# Altium integrated library Transistor.IntLib: 21 symbols
Pins are listed as number, name and electrical type; pins without a type are passive.

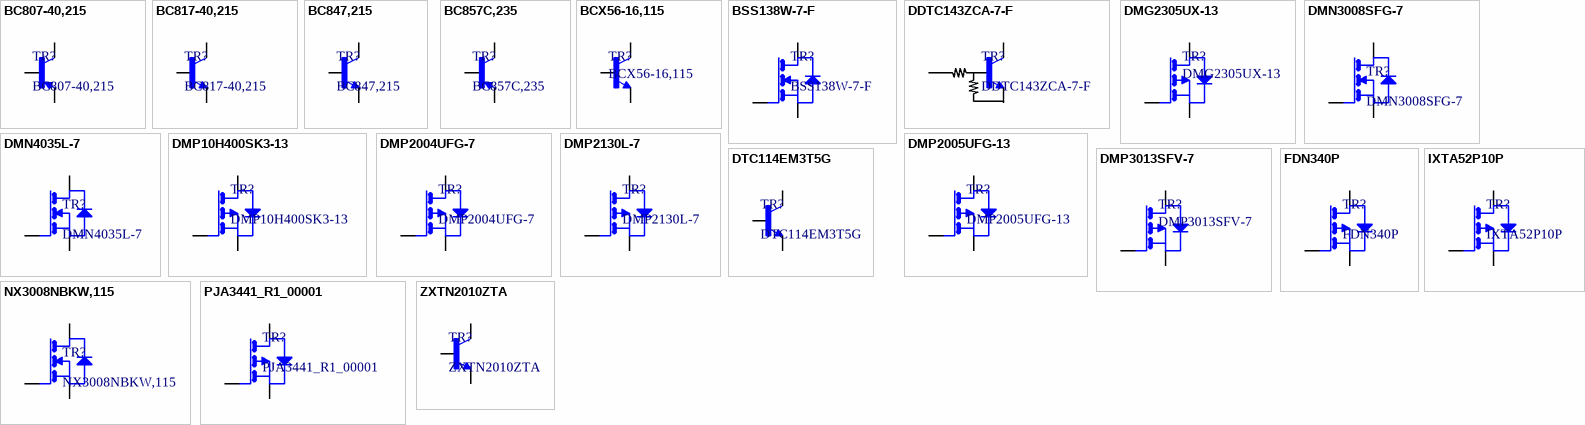
[diagram p0: symbols BC807-40,215 to ZXTN2010ZTA]

## BC807-40,215
designator TR?
TRANS PNP 45V 0.5A SOT23; Manufacturer: Nexperia; Purpose Of Usage: BASIC; Supplier 1: Digi-Key; Manufacturer Part Number: BC807-40,215; RoHS: YES; Category: TRANSISTOR; Supplier Part Number 1: 1727-2917-1-ND; Case/Package: SOT-23-3; Max Operating Temperature: 150°C; Min Operating Temperature: -55°C; Mount: SMD; Sub-Category: PNP; Stock ID: ??
footprint SOT23-3 (SOT23, 3-Leads, Body 2.92x2.51mm, Pitch 0.95mm, IPC Medium Density)
pins: 1 B, 2 E, 3 C

## BC817-40,215
designator TR?
TRANS NPN 45V 0.5A SOT23; Manufacturer: Nexperia; Purpose Of Usage: BASIC; Supplier 1: Digi-Key; Manufacturer Part Number: BC817-40,215; RoHS: YES; Category: TRANSISTOR; Supplier Part Number 1: 1727-2919-1-ND; Case/Package: SOT-23-3; Max Operating Temperature: 150°C; Min Operating Temperature: -55°C; Mount: SMD; Sub-Category: NPN; Stock ID: ??
footprint SOT23-3 (SOT23, 3-Leads, Body 2.92x2.51mm, Pitch 0.95mm, IPC Medium Density)
pins: 1 B, 2 E, 3 C

## BC847,215
designator TR?
TRANS NPN 45V 0.1A SOT23; Manufacturer: Nexperia; Purpose Of Usage: BASIC; Supplier 1: Digi-Key; Supplier Part Number 1: 1727-4855-1-ND; Manufacturer Part Number: BC847,215; RoHS: NO; Category: TRANSISTOR; Case/Package: SOT-23-3; Max Operating Temperature: 150°C; Min Operating Temperature: -55°C; Mount: SMD; Sub-Category: NPN; Stock ID: ??; Price 10K: 0.021; Local Supplier: OZDISAN
footprint SOT23-3 (SOT23, 3-Leads, Body 2.92x2.51mm, Pitch 0.95mm, IPC Medium Density)
pins: 1 B, 2 E, 3 C

## BC857C,235
designator TR?
TRANS PNP 45V 0.1A SOT23; Manufacturer: Nexperia; Purpose Of Usage: BASIC; Supplier 1: Digi-Key; Manufacturer Part Number: BC857C,235; RoHS: YES; Supplier Part Number 1: 1727-1139-1-ND; Category: TRANSISTOR; Case/Package: SOT-23-3; Max Operating Temperature: 150°C; Min Operating Temperature: -55°C; Mount: SMD; Sub-Category: PNP; Stock ID: ??
footprint SOT23-3 (SOT23, 3-Leads, Body 2.92x2.51mm, Pitch 0.95mm, IPC Medium Density)
pins: 1 B, 2 E, 3 C

## BCX56-16,115
designator TR?
TRANS, NPN, 80V, 1A, 3SOT89; Manufacturer: Nexperia; Purpose Of Usage: BASIC; Supplier 1: Digi-Key; Supplier Part Number 1: 1727-2930-1-ND; Manufacturer Part Number: BCX56-16,115; RoHS: NO; Category: TRANSISTOR; Case/Package: SOT-89; Max Operating Temperature: 150°C; Min Operating Temperature: -55°C; Mount: SMD; Sub-Category: NPN; Stock ID: ??
footprint SOT89
pins: 1 B, 2 C, 3 E

## BSS138W-7-F
designator TR?
BSS138W-7-F. - BSS FAMILY SOT323 T&R 3K ROHS COMPLIANT: YES; Manufacturer: Diodes; Max Power Dissipation: 200mW; Polarity: N-CHANNEL; Purpose Of Usage: BASIC; Supplier 1: Digi-Key; Manufacturer Part Number: BSS138W-7-F; RoHS: YES; Mount: SMD; Case/Package: SOT-23-3; Min Operating Temperature: -55°C; Max Operating Temperature: 150°C; Power Dissipation: 200mW; Supplier Part Number 1: BSS138W-FDICT-ND; Category: MOSFETs; Sub-Category: N-CHANNEL; Stock ID: ??
footprint SOT23-3 (SOT23, 3-Leads, Body 2.92x2.51mm, Pitch 0.95mm, IPC Medium Density)
pins: 1 G, 2 S, 3 D

## DDTC143ZCA-7-F
designator TR?
TRANS PREBIAS NPN 200MW SOT23-3; Manufacturer: Diodes; Purpose Of Usage: BASIC; Supplier 1: Digi-Key; Manufacturer Part Number: DDTC143ZCA-7-F; RoHS: YES; Category: TRANSISTOR; Case/Package: SOT-23-3; Min Operating Temperature: -55°C; Max Operating Temperature: 150°C; Max Power Dissipation: 200mW; Polarity: NPN; Supplier Part Number 1: DDTC143ZCA-FDITR-ND; Mount: SMD; Stock ID: ??; Sub-Category: NPN
footprint SOT23-3 (SOT23, 3-Leads, Body 2.92x2.51mm, Pitch 0.95mm, IPC Medium Density)
pins: 1 B, 2 E, 3 C

## DMG2305UX-13
designator TR?
Power MOSFET, P Channel, 20 V, 4.2 A, 0.04 ohm, SOT-23; Manufacturer: Diodes; Max Power Dissipation: 1.4W; Purpose Of Usage: BASIC; Supplier 1: Digi-Key; Manufacturer Part Number: DMG2305UX-13; RoHS: YES; Mount: SMD; Case/Package: SOT-23-3; Min Operating Temperature: -55°C; Max Operating Temperature: 150°C; Category: MOSFETs; Supplier Part Number 1: DMG2305UX-13DICT-ND; Sub-Category: P-CHANNEL; Stock ID: ??
footprint SOT23-3 (SOT23, 3-Leads, Body 2.92x2.51mm, Pitch 0.95mm, IPC Medium Density)
pins: 1 G, 2 S, 3 D

## DMN3008SFG-7
designator TR?
Trans MOSFET N-CH 30V 17.6A Automotive 8-Pin PowerDI EP T/R; Manufacturer: Diodes; Max Power Dissipation: 900mW; Polarity: N-CHANNEL; Purpose Of Usage: BASIC; Supplier 1: Digi-Key; Manufacturer Part Number: DMN3008SFG-7; RoHS: YES; Category: MOSFETs; Min Operating Temperature: -55°C; Max Operating Temperature: 150°C; Supplier Part Number 1: DMN3008SFG-7DITR-ND; Case/Package: DI3333-8; Mount: SMD; Stock ID: ??; Sub-Category: N-CHANNEL
footprint PowerDI3333-8
pins: 1 S, 2 G, 3 D

## DMN4035L-7
designator TR?
Trans MOSFET N-CH 40V 4.1A; Manufacturer: Diodes; Max Power Dissipation: 720mW; Polarity: N-CHANNEL; Purpose Of Usage: BASIC; Supplier 1: Digi-Key; Manufacturer Part Number: DMN4035L-7; RoHS: YES; Category: MOSFETs; Min Operating Temperature: -55°C; Max Operating Temperature: 150°C; Supplier Part Number 1: 31-DMN4035L-7TR-ND; Case/Package: DI3333-8; Mount: SMD; Stock ID: ??; Sub-Category: N-CHANNEL; MSL: 1
footprint SOT23-3 (SOT23, 3-Leads, Body 2.92x2.51mm, Pitch 0.95mm, IPC Medium Density)
pins: 1 G, 2 S, 3 D

## DMP10H400SK3-13
designator TR?
Trans MOSFET P-CH 100V 9A Automotive 3-Pin(2+Tab) TO-252 T/R; Manufacturer: Diodes; Polarity: P-CHANNEL; Purpose Of Usage: BASIC; Manufacturer Part Number: DMP10H400SK3-13; RoHS: YES; Category: MOSFETs; Case/Package: TO252-3; Max Operating Temperature: 150°C; Min Operating Temperature: -55°C; Mount: SMD; MSL: 1; Stock ID: ??; Sub-Category: P-CHANNEL; Supplier 1: Digi-Key; Supplier Part Number 1: DMP10H400SK3-13DITR-ND
footprint TO252-3
pins: 1 G, 2 G, 3 D

## DMP2004UFG-7
designator TR?
Mosfet Bvdss: 8V~24V POWERDI3333-8 T&r 2K; Manufacturer: Diodes; Polarity: P-CHANNEL; Purpose Of Usage: BASIC; Supplier 1: Digi-Key; Manufacturer Part Number: DMP2004UFG-7; RoHS: YES; Category: MOSFETs; Supplier Part Number 1: 31-DMP2004UFG-7-ND; Case/Package: DI3333-8; Max Operating Temperature: 150°C; Min Operating Temperature: -55°C; Mount: SMD; Stock ID: ??; Sub-Category: P-CHANNEL
footprint PowerDI3333-8
pins: 1 S, 2 G, 3 D

## DMP2005UFG-13
designator TR?
20V P-channel Enhancement Mode Mosfet, 20V Vds, 10±V Vgs; Manufacturer: Diodes; Max Power Dissipation: 2.2W; Purpose Of Usage: BASIC; Manufacturer Part Number: DMP2005UFG-13; RoHS: YES; Category: MOSFETs; Min Operating Temperature: -55°C; Max Operating Temperature: 150°C; Case/Package: DI3333-8; Mount: SMD; Polarity: P-CHANNEL; Stock ID: ??; Sub-Category: P-CHANNEL; Supplier 1: Digi-Key; Supplier Part Number 1: 31-DMP2005UFG-13CT-ND
footprint PowerDI3333-8
pins: 1 S, 2 G, 3 D

## DMP2130L-7
designator TR?
P-Channel 20 V 75 mOhm 7.3 nC Surface Mount Enhancement Mode Mosfet - SOT-23; Manufacturer: Diodes; Purpose Of Usage: BASIC; Manufacturer Part Number: DMP2130L-7; RoHS: YES; Category: MOSFETs; Case/Package: SOT-23-3; Max Operating Temperature: 150°C; Min Operating Temperature: -55°C; Mount: SMD; Polarity: P-CHANNEL; Stock ID: ??; Sub-Category: P-CHANNEL; Supplier 1: Digi-Key; Supplier Part Number 1: DMP2130LDICT-ND
footprint SOT23-3 (SOT23, 3-Leads, Body 2.92x2.51mm, Pitch 0.95mm, IPC Medium Density)
pins: 1 G, 2 S, 3 D

## DMP3013SFV-7
designator TR?
MOSFET BVDSS: 25V 30V POWERDI333; Manufacturer: Diodes; Max Power Dissipation: 940mW; Purpose Of Usage: BASIC; Supplier 1: Digi-Key; Supplier Part Number 1: DMP3013SFV-7DICT-ND; Manufacturer Part Number: DMP3013SFV-7; RoHS: NO; Mount: SMD; Min Operating Temperature: -55°C; Max Operating Temperature: 150°C; Category: MOSFETs; Case/Package: DI3333-8; Sub-Category: P-CHANNEL; Stock ID: ??
footprint PowerDI3333-8
pins: 1 S, 2 G, 3 D

## DTC114EM3T5G
designator TR?
TRANS NPN 50V 0.1A SOT-723; Manufacturer: ON Semiconductor; Max Power Dissipation: 260mW; Purpose Of Usage: BASIC; Supplier 1: Digi-Key; Manufacturer Part Number: DTC114EM3T5G; RoHS: YES; Category: TRANSISTOR; Case/Package: SOT-723-3; Min Operating Temperature: -55°C; Max Operating Temperature: 150°C; Polarity: NPN; Power Dissipation: 260mW; Supplier Part Number 1: DTC114EM3T5GOSCT-ND; Mount: SMD; Sub-Category: NPN; Stock ID: ??
footprint SOT-723 (SOT23, 3-Leads, Body 1.20x1.20mm, Pitch 0.40mm, IPC Medium Density)
pins: 1 B, 2 E, 3 C

## FDN340P
designator TR?
Trans Mosfet P-ch 20V 2A 3-PIN SOT-23 T/r; Manufacturer: ON Semiconductor / Fairchild; Max Power Dissipation: 500mW; Polarity: P-CHANNEL; Purpose Of Usage: BASIC; Supplier 1: Digi-Key; Manufacturer Part Number: FDN340P; RoHS: YES; Category: MOSFETs; Mount: SMD; Case/Package: SOT-23-3; Min Operating Temperature: -55°C; Max Operating Temperature: 150°C; Power Dissipation: 500mW; Supplier Part Number 1: FDN340PCT-ND; Sub-Category: P-CHANNEL; Stock ID: ??
footprint SOT23-3 (SOT23, 3-Leads, Body 2.92x2.51mm, Pitch 0.95mm, IPC Medium Density)
pins: 1 G, 2 S, 3 D

## IXTA52P10P
designator TR?
Trans MOSFET P-CH 100V 52A 3-Pin(2+Tab) D2PAK; Manufacturer: IXYS; Polarity: P-CHANNEL; Supplier: Mouser; Supplier Part Number: 747-IXTA52P10P; Manufacturer Part Number: IXTA52P10P; RoHS: YES; Category: MOSFETs; Stock: 1963; Pricing: 1=7.82, 10=7, 50=4.35, 100=4, 1000=3.45, 10000=3.45 (USD); ComponentLink1URL: https://datasheet.ciiva.com/6383/ds99912aixta-h-p-q52p10p-6383979.pdf?src-supplier=Digikey; ComponentLink1Description: https://datasheet.ciiva.com/6383/ds99912aixta-h-p-q52p10p-6383979.pdf?src-supplier=Digikey; Case/Package: TO-263; Max Operating Temperature: 150°C; Min Operating Temperature: -55°C; Mount: SMD; Stock ID: ??; Sub-Category: P-CHANNEL; Supplier 1: Digi-Key; Supplier Part Number 1: IXTA52P10P-ND
footprint TO263AA
pins: 1 G, 2 D, 3 S

## NX3008NBKW,115
designator TR?
MOSFET N-CH 30V SOT323; Manufacturer: Nexperia; Polarity: N-CHANNEL; Purpose Of Usage: BASIC; Supplier 1: Digi-Key; Manufacturer Part Number: NX3008NBKW,115; RoHS: YES; Category: MOSFETs; Supplier Part Number 1: 1727-1280-2-ND; Case/Package: SOT-32-3; Max Operating Temperature: 150°C; Min Operating Temperature: -55°C; Mount: SMD; Stock ID: ??; Sub-Category: N-CHANNEL
footprint SOT323 (SOT23, 3-Leads, Body 2.92x2.51mm, Pitch 0.95mm, IPC Medium Density)
pins: 1 G, 2 S, 3 D

## PJA3441_R1_00001
designator TR?
Manufacturer: Pan Jit; Polarity: P-CHANNEL; Purpose Of Usage: BASIC; Manufacturer Part Number: PJA3441_R1_00001; RoHS: NO; Case/Package: SOT-23-3; Category: MOSFETs; Local Supplier: OZDISAN; Max Operating Temperature: 150°C; Min Operating Temperature: -55°C; Mount: SMD; Price 10K: 0.07; Stock ID: ??; Sub-Category: P-CHANNEL; Supplier 1: Digi-Key; Supplier Part Number 1: 1727-1280-2-ND
footprint SOT23-3 (SOT23, 3-Leads, Body 2.92x2.51mm, Pitch 0.95mm, IPC Medium Density)
pins: 1 G, 2 S, 3 D

## ZXTN2010ZTA
designator TR?
TRANS, NPN, 60V, 5A, SOT89-3; Manufacturer: Diodes Zetex; Max Power Dissipation: 2.1W; Emitter Base Voltage (VEBO): 7V; Collector-emitter Voltage-Max: 230mV; Purpose Of Usage: BASIC; Manufacturer Part Number: ZXTN2010ZTA; RoHS: Yes; Category: TRANSISTOR; Case/Package: SOT-89; Min Operating Temperature: -55°C; Max Operating Temperature: 150°C; Collector Emitter Voltage (VCEO): 60V; Max Collector Current: 5A; Collector Emitter Breakdown Voltage: 60V; Max Breakdown Voltage: 60V; Polarity: NPN; Continuous Collector Current: 5A; Power Dissipation: 2.1W; Current Rating: 5A; Length: 4.6mm; Height: 1.6mm; Lead Free: Lead Free; Local Supplier: OZDISAN; Mount: SMD; Price 10K: 0.07; Stock ID: ??; Sub-Category: NPN; Supplier 1: Digi-Key; Supplier Part Number 1: ZXTN2010ZTR-ND
footprint SOT89
pins: 1 B, 2 C, 3 E